# Altium footprint library FootPrintLib_9.PcbLib: 287 footprints (part 18 of 18)
Each footprint in its own frame and in the unit in brackets; x right, y up, seen from the top. Pads: shape width x height; smd on the part's side, far side on the other; paste and mask are expansions set on the pad; w line width, h text height; cw(c..) or ccw(c..) is an arc to the next point about the centre after c.
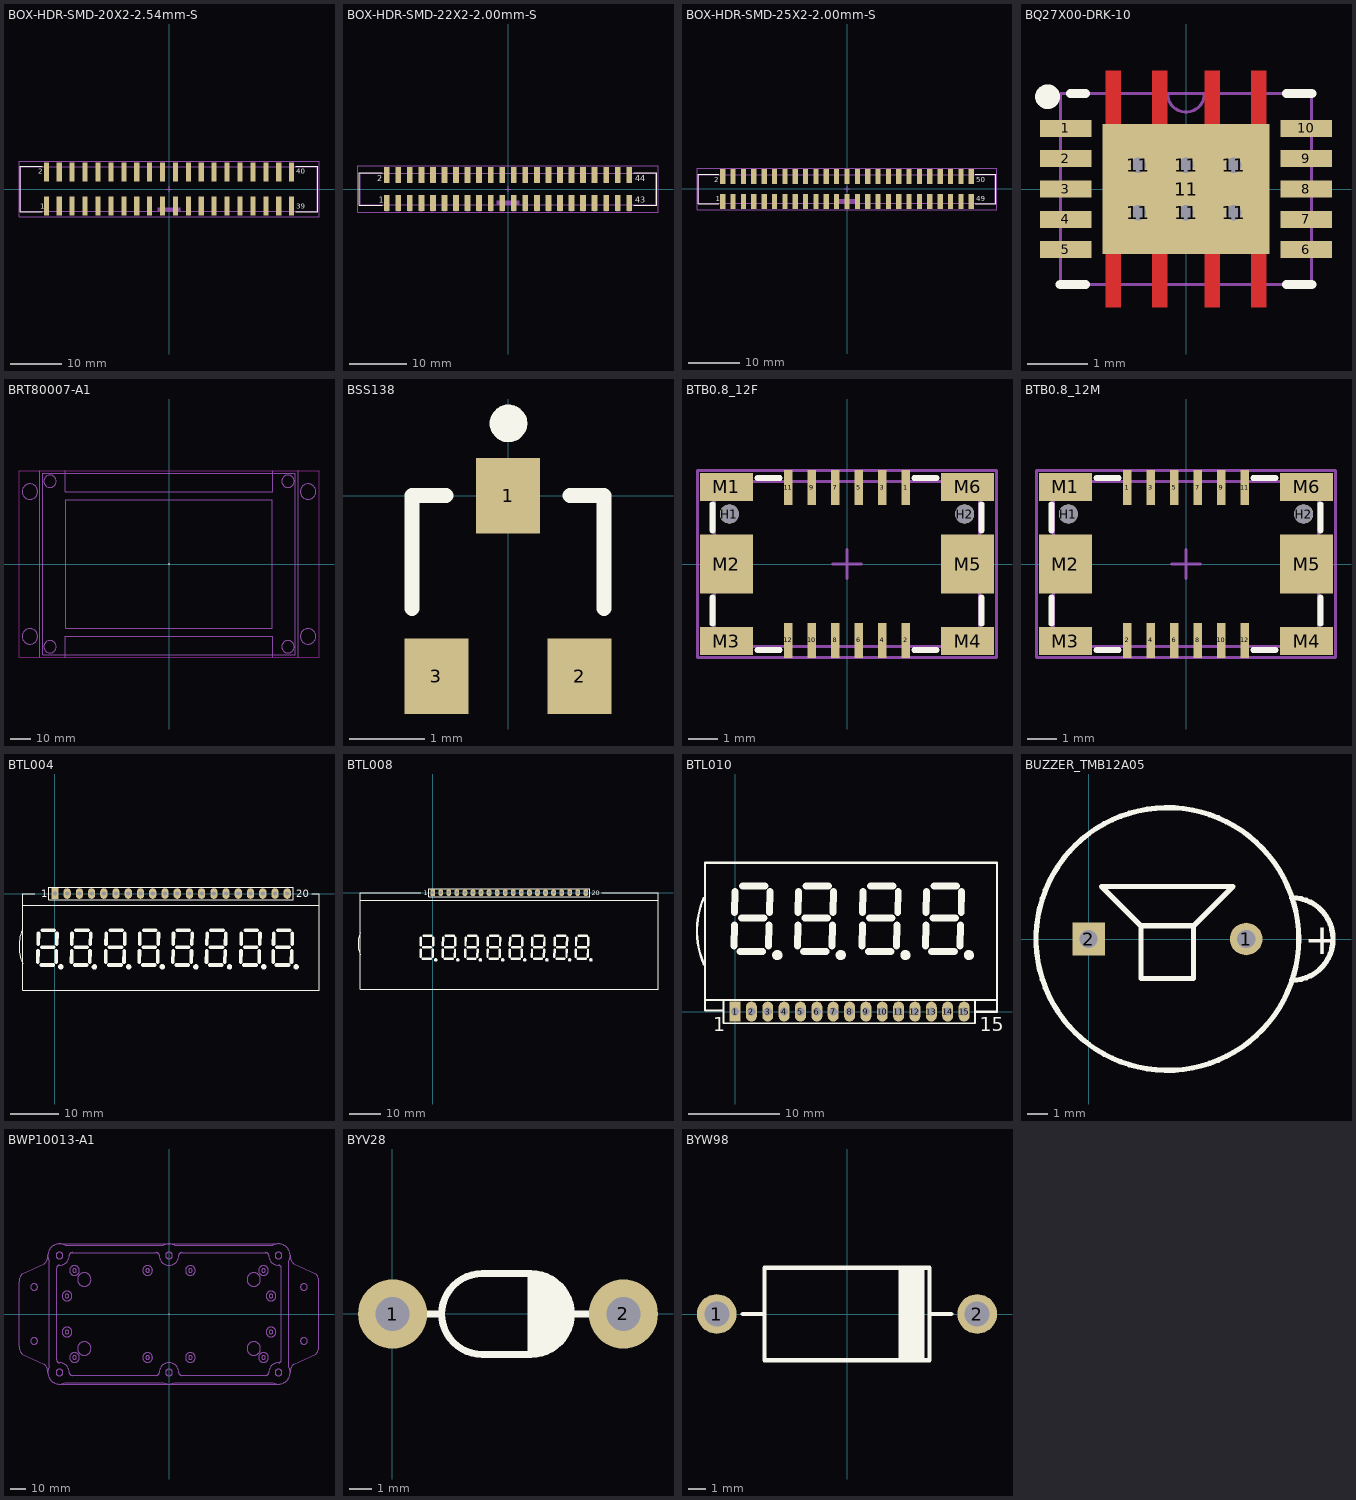
[diagram p17: the footprints below, top view; thin cyan lines are the x and y axes]

## BOX-HDR-SMD-20X2-2.54mm-S [mm] "40 pins, SMT, straight, gold plating"
height 9.2
pads (40):
  rect 1x3.75 smd: 1(-24.13,-3.375) 2(-24.13,3.375) 3(-21.59,-3.375) 4(-21.59,3.375) 5(-19.05,-3.375) 6(-19.05,3.375) 7(-16.51,-3.375) 8(-16.51,3.375) 9(-13.97,-3.375) 10(-13.97,3.375) 11(-11.43,-3.375) 12(-11.43,3.375) 13(-8.89,-3.375) 14(-8.89,3.375) 15(-6.35,-3.375) 16(-6.35,3.375) 17(-3.81,-3.375) 18(-3.81,3.375) 19(-1.27,-3.375) 20(-1.27,3.375) 21(1.27,-3.375) 22(1.27,3.375) 23(3.81,-3.375) 24(3.81,3.375) 25(6.35,-3.375) 26(6.35,3.375) 27(8.89,-3.375) 28(8.89,3.375) 29(11.43,-3.375) 30(11.43,3.375) 31(13.97,-3.375) 32(13.97,3.375) 33(16.51,-3.375) 34(16.51,3.375) 35(19.05,-3.375) 36(19.05,3.375) 37(21.59,-3.375) 38(21.59,3.375) 39(24.13,-3.375) 40(24.13,3.375)
Top Overlay:
  lines w0.2: -24.92,-4.5 -29.3,-4.5 -29.3,4.5 -24.92,4.5 ; 24.92,-4.5 29.3,-4.5 29.3,4.5 24.92,4.5
  text "1" at -25.32,-3.9 h1.02
  text "2" at -25.72,3 h1.02
  text "40" at 25.02,3 h1.02
  text "39" at 25.02,-3.9 h1.02
Mechanical 13:
  rectangle: -2.25,-4.4 2.25,-3.6
  lines w0.1: -29.15,-4.4 29.15,-4.4 29.15,4.4 -29.15,4.4 -29.15,-4.4
Mechanical 15:
  lines w0.05: -0.5,0 0.5,0 ; 0,-0.5 0,0.5 ; -29.5,-5.45 -29.5,5.45 29.5,5.45 29.5,-5.45 -29.5,-5.45
3D body "61204020621.stp": height 10.2, standoff 0.01, extent -29.21,-4.75 29.21,4.75

## BOX-HDR-SMD-22X2-2.00mm-S [mm] "2.00mm Male SMT Box Header, 44p"
height 6.8
pads (44):
  rect 1x2.85 smd: 1(-21,-2.425) 2(-21,2.425) 3(-19,-2.425) 4(-19,2.425) 5(-17,-2.425) 6(-17,2.425) 7(-15,-2.425) 8(-15,2.425) 9(-13,-2.425) 10(-13,2.425) 11(-11,-2.425) 12(-11,2.425) 13(-9,-2.425) 14(-9,2.425) 15(-7,-2.425) 16(-7,2.425) 17(-5,-2.425) 18(-5,2.425) 19(-3,-2.425) 20(-3,2.425) 21(-1,-2.425) 22(-1,2.425) 23(1,-2.425) 24(1,2.425) 25(3,-2.425) 26(3,2.425) 27(5,-2.425) 28(5,2.425) 29(7,-2.425) 30(7,2.425) 31(9,-2.425) 32(9,2.425) 33(11,-2.425) 34(11,2.425) 35(13,-2.425) 36(13,2.425) 37(15,-2.425) 38(15,2.425) 39(17,-2.425) 40(17,2.425) 41(19,-2.425) 42(19,2.425) 43(21,-2.425) 44(21,2.425)
Top Overlay:
  lines w0.2: -21.8,-2.85 -25.775,-2.85 -25.775,2.85 -21.8,2.85 ; 21.8,-2.85 25.775,-2.85 25.775,2.85 21.8,2.85
  text "2" at -22.6,1.3 h1.02
  text "1" at -22.4,-2.4 h1.02
  text "44" at 22,1.3 h1.02
  text "43" at 22,-2.4 h1.02
Mechanical 13:
  rectangle: -2,-2.75 2,-1.95
  lines w0.1: -21.25,-2.75 -21.25,-3.75 -20.75,-3.75 -20.75,-2.75 ; -21.25,2.75 -21.25,3.75 -20.75,3.75 -20.75,2.75 ; -19.25,-2.75 -19.25,-3.75 -18.75,-3.75 -18.75,-2.75 ; -19.25,2.75 -19.25,3.75 -18.75,3.75 -18.75,2.75 ; -17.25,-2.75 -17.25,-3.75 -16.75,-3.75 -16.75,-2.75 ; -17.25,2.75 -17.25,3.75 -16.75,3.75 -16.75,2.75 ; -15.25,-2.75 -15.25,-3.75 -14.75,-3.75 -14.75,-2.75 ; -15.25,2.75 -15.25,3.75 -14.75,3.75 -14.75,2.75 ; -13.25,-2.75 -13.25,-3.75 -12.75,-3.75 -12.75,-2.75 ; -13.25,2.75 -13.25,3.75 -12.75,3.75 -12.75,2.75 ; -11.25,-2.75 -11.25,-3.75 -10.75,-3.75 -10.75,-2.75 ; -11.25,2.75 -11.25,3.75 -10.75,3.75 -10.75,2.75 ; -9.25,-2.75 -9.25,-3.75 -8.75,-3.75 -8.75,-2.75 ; -9.25,2.75 -9.25,3.75 -8.75,3.75 -8.75,2.75 ; -7.25,-2.75 -7.25,-3.75 -6.75,-3.75 -6.75,-2.75 ; -7.25,2.75 -7.25,3.75 -6.75,3.75 -6.75,2.75 ; -5.25,-2.75 -5.25,-3.75 -4.75,-3.75 -4.75,-2.75 ; -5.25,2.75 -5.25,3.75 -4.75,3.75 -4.75,2.75 ; -3.25,-2.75 -3.25,-3.75 -2.75,-3.75 -2.75,-2.75 ; -3.25,2.75 -3.25,3.75 -2.75,3.75 -2.75,2.75 ; -1.25,-2.75 -1.25,-3.75 -0.75,-3.75 -0.75,-2.75 ; -1.25,2.75 -1.25,3.75 -0.75,3.75 -0.75,2.75 ; 0.75,-2.75 0.75,-3.75 1.25,-3.75 1.25,-2.75 ; 0.75,2.75 0.75,3.75 1.25,3.75 1.25,2.75 ; 2.75,-2.75 2.75,-3.75 3.25,-3.75 3.25,-2.75 ; 2.75,2.75 2.75,3.75 3.25,3.75 3.25,2.75 ; 4.75,-2.75 4.75,-3.75 5.25,-3.75 5.25,-2.75 ; 4.75,2.75 4.75,3.75 5.25,3.75 5.25,2.75 ; 6.75,-2.75 6.75,-3.75 7.25,-3.75 7.25,-2.75 ; 6.75,2.75 6.75,3.75 7.25,3.75 7.25,2.75 ; 8.75,-2.75 8.75,-3.75 9.25,-3.75 9.25,-2.75 ; 8.75,2.75 8.75,3.75 9.25,3.75 9.25,2.75 ; 10.75,-2.75 10.75,-3.75 11.25,-3.75 11.25,-2.75 ; 10.75,2.75 10.75,3.75 11.25,3.75 11.25,2.75 ; 12.75,-2.75 12.75,-3.75 13.25,-3.75 13.25,-2.75 ; 12.75,2.75 12.75,3.75 13.25,3.75 13.25,2.75 ; 14.75,-2.75 14.75,-3.75 15.25,-3.75 15.25,-2.75 ; 14.75,2.75 14.75,3.75 15.25,3.75 15.25,2.75 ; 16.75,-2.75 16.75,-3.75 17.25,-3.75 17.25,-2.75 ; 16.75,2.75 16.75,3.75 17.25,3.75 17.25,2.75 ; 18.75,-2.75 18.75,-3.75 19.25,-3.75 19.25,-2.75 ; 18.75,2.75 18.75,3.75 19.25,3.75 19.25,2.75 ; 20.75,-2.75 20.75,-3.75 21.25,-3.75 21.25,-2.75 ; 20.75,2.75 20.75,3.75 21.25,3.75 21.25,2.75 ; -25.625,-2.75 25.625,-2.75 25.625,2.75 -25.625,2.75 -25.625,-2.75
Mechanical 15:
  lines w0.05: -0.5,0 0.5,0 ; 0,-0.5 0,0.5 ; -25.975,-4.05 -25.975,4.05 25.975,4.05 25.975,-4.05 -25.975,-4.05
3D body "62534420621 (rev1).stp": height 8.55, standoff 0, extent -25.625,-3.75 25.625,3.75

## BOX-HDR-SMD-25X2-2.00mm-S [mm] "2.00mm Male SMT Box Header, 50p"
height 6.8
pads (50):
  rect 1x2.85 smd: 1(-24,-2.425) 2(-24,2.425) 3(-22,-2.425) 4(-22,2.425) 5(-20,-2.425) 6(-20,2.425) 7(-18,-2.425) 8(-18,2.425) 9(-16,-2.425) 10(-16,2.425) 11(-14,-2.425) 12(-14,2.425) 13(-12,-2.425) 14(-12,2.425) 15(-10,-2.425) 16(-10,2.425) 17(-8,-2.425) 18(-8,2.425) 19(-6,-2.425) 20(-6,2.425) 21(-4,-2.425) 22(-4,2.425) 23(-2,-2.425) 24(-2,2.425) 25(0,-2.425) 26(0,2.425) 27(2,-2.425) 28(2,2.425) 29(4,-2.425) 30(4,2.425) 31(6,-2.425) 32(6,2.425) 33(8,-2.425) 34(8,2.425) 35(10,-2.425) 36(10,2.425) 37(12,-2.425) 38(12,2.425) 39(14,-2.425) 40(14,2.425) 41(16,-2.425) 42(16,2.425) 43(18,-2.425) 44(18,2.425) 45(20,-2.425) 46(20,2.425) 47(22,-2.425) 48(22,2.425) 49(24,-2.425) 50(24,2.425)
Top Overlay:
  lines w0.2: -24.8,-2.85 -28.775,-2.85 -28.775,2.85 -24.8,2.85 ; 24.8,-2.85 28.775,-2.85 28.775,2.85 24.8,2.85
  text "1" at -25.4,-2.4 h1.02
  text "2" at -25.6,1.3 h1.02
  text "50" at 25,1.3 h1.02
  text "49" at 25,-2.4 h1.02
Mechanical 13:
  drawing of 155 lines, arcs and shapes, not listed
Mechanical 15:
  lines w0.05: -0.5,0 0.5,0 ; 0,-0.5 0,0.5 ; -28.975,-4.05 28.975,-4.05 28.975,4.05 -28.975,4.05 -28.975,-4.05
3D body "62535020621 (rev1).stp": height 8.55, standoff 0, extent -28.625,-3.75 28.625,3.75

## BQ27X00-DRK-10 [mm] "BQ27200,BQ27000 DRK(S-PVSON-N10)"
height 1
pads (17):
  rect 0.85x0.28 smd paste-0.412: 1(-1.981,1) 2(-1.981,0.5) 3(-1.981,0) 4(-1.981,-0.5) 5(-1.981,-1) 6(1.981,-1) 7(1.981,-0.5) 8(1.981,0) 9(1.981,0.5) 10(1.981,1)
  round 0.508 / inner round 1.524 / far side round 0.508 hole 0.254: 11(-0.787,-0.394) 11(-0.787,0.394) 11(0,-0.394) 11(0,0.394) 11(0.787,-0.394) 11(0.787,0.394)
  rect 2.75x2.15 smd paste-1.362 mask-1.359: 11(0,0)
Top Layer:
  region: -0.31,1.95 -0.31,1.075 -0.56,1.075 -0.56,1.95
  region: 0.31,1.95 0.31,1.075 0.56,1.075 0.56,1.95
  region: -1.075,1.95 -1.075,1.075 -1.325,1.075 -1.325,1.95
  region: 1.075,1.95 1.075,1.075 1.325,1.075 1.325,1.95
  region: -0.31,-1.95 -0.31,-1.075 -0.56,-1.075 -0.56,-1.95
  region: 0.31,-1.95 0.31,-1.075 0.56,-1.075 0.56,-1.95
  region: -1.075,-1.95 -1.075,-1.075 -1.325,-1.075 -1.325,-1.95
  region: 1.075,-1.95 1.075,-1.075 1.325,-1.075 1.325,-1.95
Top Overlay:
  circle w0.254: c-2.286,1.524 r0.076
  lines w0.152: -2.075,-1.575 -1.658,-1.575 ; -1.905,1.575 -1.658,1.575 ; 1.658,-1.575 2.075,-1.575 ; 1.658,1.575 2.075,1.575
Top Paste:
  region: -1.581,1.115 -2.381,1.115 -2.381,0.885 -1.581,0.885
  region: -1.581,0.615 -2.381,0.615 -2.381,0.385 -1.581,0.385
  region: -1.581,0.115 -2.381,0.115 -2.381,-0.115 -1.581,-0.115
  region: -1.581,-0.385 -2.381,-0.385 -2.381,-0.615 -1.581,-0.615
  region: -1.581,-0.885 -2.381,-0.885 -2.381,-1.115 -1.581,-1.115
  region: 2.381,-0.885 1.581,-0.885 1.581,-1.115 2.381,-1.115
  region: 2.381,-0.385 1.581,-0.385 1.581,-0.615 2.381,-0.615
  region: 2.381,0.115 1.581,0.115 1.581,-0.115 2.381,-0.115
  region: 2.381,0.615 1.581,0.615 1.581,0.385 2.381,0.385
  region: 2.381,1.115 1.581,1.115 1.581,0.885 2.381,0.885
  region: -0.335,1.925 -0.335,1.1 -0.535,1.1 -0.535,1.925
  region: 0.335,1.925 0.335,1.1 0.535,1.1 0.535,1.925
  region: -1.1,1.925 -1.1,1.1 -1.3,1.1 -1.3,1.925
  region: 1.1,1.925 1.1,1.1 1.3,1.1 1.3,1.925
  region: -0.335,-1.925 -0.335,-1.1 -0.535,-1.1 -0.535,-1.925
  region: 0.335,-1.925 0.335,-1.1 0.535,-1.1 0.535,-1.925
  region: -1.1,-1.925 -1.1,-1.1 -1.3,-1.1 -1.3,-1.925
  region: 1.1,-1.925 1.1,-1.1 1.3,-1.1 1.3,-1.925
  region: -0.887,1 -1.3,1 -1.3,0.494 -1.029,0.494 -0.887,0.635
  region: -1.029,0.294 -1.3,0.294 -1.3,-0.294 -1.029,-0.294 -0.887,-0.152 -0.887,0.152
  region: -1.029,-0.494 -1.3,-0.494 -1.3,-1 -0.887,-1 -0.887,-0.635
  region: -0.1,1 -0.687,1 -0.687,0.635 -0.546,0.494 -0.241,0.494 -0.1,0.635
  region: -0.241,0.294 -0.546,0.294 -0.687,0.152 -0.687,-0.152 -0.546,-0.294 -0.241,-0.294 -0.1,-0.152 -0.1,0.152
  region: -0.241,-0.494 -0.546,-0.494 -0.687,-0.635 -0.687,-1 -0.1,-1 -0.1,-0.635
  region: 0.687,1 0.1,1 0.1,0.635 0.241,0.494 0.546,0.494 0.687,0.635
  region: 0.546,0.294 0.241,0.294 0.1,0.152 0.1,-0.152 0.241,-0.294 0.546,-0.294 0.687,-0.152 0.687,0.152
  region: 0.546,-0.494 0.241,-0.494 0.1,-0.635 0.1,-1 0.687,-1 0.687,-0.635
  region: 1.3,1 0.887,1 0.887,0.635 1.029,0.494 1.3,0.494
  region: 1.3,0.294 1.029,0.294 0.887,0.152 0.887,-0.152 1.029,-0.294 1.3,-0.294
  region: 1.3,-0.494 1.029,-0.494 0.887,-0.635 0.887,-1 1.3,-1
Top Solder:
  region: -1.486,1.21 -2.476,1.21 -2.476,0.79 -1.486,0.79
  region: -1.486,0.71 -2.476,0.71 -2.476,0.29 -1.486,0.29
  region: -1.486,0.21 -2.476,0.21 -2.476,-0.21 -1.486,-0.21
  region: -1.486,-0.29 -2.476,-0.29 -2.476,-0.71 -1.486,-0.71
  region: -1.486,-0.79 -2.476,-0.79 -2.476,-1.21 -1.486,-1.21
  region: 2.476,-0.79 1.486,-0.79 1.486,-1.21 2.476,-1.21
  region: 2.476,-0.29 1.486,-0.29 1.486,-0.71 2.476,-0.71
  region: 2.476,0.21 1.486,0.21 1.486,-0.21 2.476,-0.21
  region: 2.476,0.71 1.486,0.71 1.486,0.29 2.476,0.29
  region: 2.476,1.21 1.486,1.21 1.486,0.79 2.476,0.79
  region: -0.31,1.95 -0.31,1.075 -0.56,1.075 -0.56,1.95
  region: 0.31,1.95 0.31,1.075 0.56,1.075 0.56,1.95
  region: -1.075,1.95 -1.075,1.075 -1.325,1.075 -1.325,1.95
  region: 1.075,1.95 1.075,1.075 1.325,1.075 1.325,1.95
  region: -0.31,-1.95 -0.31,-1.075 -0.56,-1.075 -0.56,-1.95
  region: 0.31,-1.95 0.31,-1.075 0.56,-1.075 0.56,-1.95
  region: -1.075,-1.95 -1.075,-1.075 -1.325,-1.075 -1.325,-1.95
  region: 1.075,-1.95 1.075,-1.075 1.325,-1.075 1.325,-1.95
  region: -1.439,0.594 -1.439,1.138 1.439,1.138 1.439,0.594
  region: -1.439,-0.194 -1.439,0.194 1.439,0.194 1.439,-0.194
  region: -1.439,-1.138 -1.439,-0.594 1.439,-0.594 1.439,-1.138
  region: -1.439,-1.138 -1.439,1.138 -0.987,1.138 -0.987,-1.138
  region: -0.2,-1.138 -0.2,1.138 -0.587,1.138 -0.587,-1.138
  region: 0.587,-1.138 0.587,1.138 0.2,1.138 0.2,-1.138
  region: 0.987,-1.138 0.987,1.138 1.439,1.138 1.439,-1.138
Mechanical 13:
  lines w0.051: -0.305,1.575 ccw(c0,1.575) 0.305,1.575 ; -2.075,-1.575 2.075,-1.575 2.075,1.575 -2.075,1.575 -2.075,-1.575 ; -2.075,-1.15 -2.075,-0.85 -2.075,-1.15 ; -2.075,-0.65 -2.075,-0.35 -2.075,-0.65 ; -2.075,-0.15 -2.075,0.15 -2.075,-0.15 ; -2.075,0.35 -2.075,0.65 -2.075,0.35 ; -2.075,0.85 -2.075,1.15 -2.075,0.85 ; 2.075,-1.15 2.075,-0.85 2.075,-1.15 ; 2.075,-0.65 2.075,-0.35 2.075,-0.65 ; 2.075,-0.15 2.075,0.15 2.075,-0.15 ; 2.075,0.35 2.075,0.65 2.075,0.35 ; 2.075,0.85 2.075,1.15 2.075,0.85
3D body: height 1, standoff 0, extent -2.083,-1.575 2.083,1.575
3D body: height 1.01, standoff 0, extent -1.976,1.07 -1.578,1.47

## BRT80007-A1 [mm]
height 40
via 0,0 diameter 0.8 hole 0.5
Keep-Out Layer:
  lines w0.254: -72.5,-45 72.5,-45 72.5,45 -72.5,45 -72.5,-45
Mechanical 5:
  circle w0.254: c-57.5,40 r3
  circle w0.254: c-57.5,-40 r3
  circle w0.254: c57.5,-40 r3
  circle w0.254: c67.25,-35 r3.75
  circle w0.254: c67.25,35 r3.75
  circle w0.254: c-67.25,35 r3.75
  circle w0.254: c-67.25,-35 r3.75
  circle w0.254: c57.5,40 r3
  lines w0.254: -62.5,-45 -62.5,45 ; -50.15,-45 -50.15,-35 50.15,-35 50.15,-45 ; -50.15,45 -50.15,35 50.15,35 50.15,45 ; 62.5,-45 62.5,45 ; -50,-31 -50,31 50,31 50,-31 -50,-31
Mechanical 15:
  lines w0.254: -61.11,-43.9 61.11,-43.9 61.11,43.9 -61.11,43.9 -61.11,-43.9

## BSS138 [mm]
pads (3):
  rect 0.85x1 smd: 1(0,0) 2(0.95,-2.4) 3(-0.95,-2.4)
Top Overlay:
  circle w0.25: c0.007,0.959 r0.125
  lines w0.2: -1.275,-1.5 -1.275,0 -0.825,0 ; 0.825,0 1.275,0 1.275,-1.5

## BTB0.8_12F [mm] "BTB0.8-12M/F-6.0LG"
height 3.35
pads (20):
  rect 0.3x1.2 smd: 1(2,2.6) 2(2,-2.6) 3(1.2,2.6) 4(1.2,-2.6) 5(0.4,2.6) 6(0.4,-2.6) 7(-0.4,2.6) 8(-0.4,-2.6) 9(-1.2,2.6) 10(-1.2,-2.6) 11(-2,2.6) 12(-2,-2.6)
  round 0.65 hole 0.65 unplated mask-1: H1(-4,1.7) H2(4,1.7)
  rect 1.8x0.95 smd: M1(-4.1,2.625) M3(-4.1,-2.625) M4(4.1,-2.625) M6(4.1,2.625)
  rect 1.8x2 smd: M2(-4.1,0) M5(4.1,0)
Top Overlay:
  lines w0.2: -4.572,-2.032 -4.572,-1.143 ; -4.572,1.143 -4.572,2.032 ; -3.048,-2.921 -2.286,-2.921 ; -3.048,2.921 -2.286,2.921 ; 2.286,-2.921 3.048,-2.921 ; 2.286,2.921 3.048,2.921 ; 4.572,-2.032 4.572,-1.143 ; 4.572,1.143 4.572,2.032
Mechanical 13:
  lines w0.1: -4.5,-2.8 -4.5,2.8 4.5,2.8 4.5,-2.8 -4.5,-2.8
Mechanical 15:
  lines w0.1: -0.5,0 0.5,0 ; 0,-0.5 0,0.5 ; -5.08,-3.175 -5.08,3.175 5.08,3.175 5.08,-3.175 -5.08,-3.175
3D body "BTB0.8_12F.STEP": height 2.35, standoff -0.55, extent -4.5,-2.85 4.5,2.85

## BTB0.8_12M [mm] "BTB0.8-12M/F-6.0LG"
height 3.35
pads (20):
  rect 0.3x1.2 smd: 1(-2,2.6) 2(-2,-2.6) 3(-1.2,2.6) 4(-1.2,-2.6) 5(-0.4,2.6) 6(-0.4,-2.6) 7(0.4,2.6) 8(0.4,-2.6) 9(1.2,2.6) 10(1.2,-2.6) 11(2,2.6) 12(2,-2.6)
  round 0.65 hole 0.65 unplated mask-1: H1(-4,1.7) H2(4,1.7)
  rect 1.8x0.95 smd: M1(-4.1,2.625) M3(-4.1,-2.625) M4(4.1,-2.625) M6(4.1,2.625)
  rect 1.8x2 smd: M2(-4.1,0) M5(4.1,0)
Top Overlay:
  lines w0.2: -4.572,-2.032 -4.572,-1.143 ; -4.572,1.143 -4.572,2.032 ; -3.048,-2.921 -2.286,-2.921 ; -3.048,2.921 -2.286,2.921 ; 2.286,-2.921 3.048,-2.921 ; 2.286,2.921 3.048,2.921 ; 4.572,-2.032 4.572,-1.143 ; 4.572,1.143 4.572,2.032
Mechanical 13:
  lines w0.1: -4.5,-2.8 4.5,-2.8 4.5,2.8 -4.5,2.8 -4.5,-2.8
Mechanical 15:
  lines w0.1: -0.5,0 0.5,0 ; 0,-0.5 0,0.5 ; -5.08,-3.175 5.08,-3.175 5.08,3.175 -5.08,3.175 -5.08,-3.175
3D body "BTB0.8_12M.STEP": height 2.35, standoff -0.55, extent -4.5,-2.85 4.5,2.85

## BTL004 [mm] "BTL004"
height 2.8
pads (20):
  rect 1.5x2.2 hole 0.9: 1(0,0)
  oval 1.5x2.2 hole 0.9: 2(2.54,0) 3(5.08,0) 4(7.62,0) 5(10.16,0) 6(12.7,0) 7(15.24,0) 8(17.78,0) 9(20.32,0) 10(22.86,0) 11(25.4,0) 12(27.94,0) 13(30.48,0) 14(33.02,0) 15(35.56,0) 16(38.1,0) 17(40.64,0) 18(43.18,0) 19(45.72,0) 20(48.26,0)
Top Overlay:
  circle w1.016: c1.219,-15.24 r0.051
  circle w1.016: c8.204,-15.24 r0.051
  circle w1.016: c15.316,-15.24 r0.051
  circle w1.016: c22.301,-15.24 r0.051
  circle w1.016: c29.286,-15.24 r0.051
  circle w1.016: c36.271,-15.24 r0.051
  circle w1.016: c43.383,-15.24 r0.051
  circle w1.016: c50.114,-15.24 r0.051
  lines w0.2: -1.27,-1.27 -1.27,1.27 0.635,1.27 49.53,1.27 49.53,-1.27 -1.27,-1.27
  lines w0.254: -6.813,-7.52 ccw(c1.77,-10.929) -6.713,-14.58 ; -6.731,-2.413 54.864,-2.413 ; -4.191,0 -6.731,0 -6.731,-20.066 54.864,-20.066 54.864,0 53.34,0
  lines w0.762: -3.556,-14.224 -3.505,-11.938 ; -3.48,-10.541 -3.429,-8.255 ; -2.87,-14.859 -0.381,-14.859 ; -2.743,-11.176 -0.254,-11.176 ; -2.616,-7.62 -0.127,-7.62 ; 0.254,-14.224 0.305,-11.938 ; 0.381,-10.541 0.432,-8.255 ; 3.429,-14.224 3.48,-11.938 ; 3.505,-10.541 3.556,-8.255 ; 4.115,-14.859 6.604,-14.859 ; 4.242,-11.176 6.731,-11.176 ; 4.369,-7.62 6.858,-7.62 ; 7.239,-14.224 7.29,-11.938 ; 7.366,-10.541 7.417,-8.255 ; 10.541,-14.224 10.592,-11.938 ; 10.617,-10.541 10.668,-8.255 ; 11.227,-14.859 13.716,-14.859 ; 11.354,-11.176 13.843,-11.176 ; 11.481,-7.62 13.97,-7.62 ; 14.351,-14.224 14.402,-11.938 ; 14.478,-10.541 14.529,-8.255 ; 17.526,-14.224 17.577,-11.938 ; 17.602,-10.541 17.653,-8.255 ; 18.212,-14.859 20.701,-14.859 ; 18.339,-11.176 20.828,-11.176 ; 18.466,-7.62 20.955,-7.62 ; 21.336,-14.224 21.387,-11.938 ; 21.463,-10.541 21.514,-8.255 ; 24.511,-14.224 24.562,-11.938 ; 24.587,-10.541 24.638,-8.255 ; 25.197,-14.859 27.686,-14.859 ; 25.324,-11.176 27.813,-11.176 ; 25.451,-7.62 27.94,-7.62 ; 28.321,-14.224 28.372,-11.938 ; 28.448,-10.541 28.499,-8.255 ; 31.496,-14.224 31.547,-11.938 ; 31.572,-10.541 31.623,-8.255 ; 32.182,-14.859 34.671,-14.859 ; 32.309,-11.176 34.798,-11.176 ; 32.436,-7.62 34.925,-7.62 ; 35.306,-14.224 35.357,-11.938 ; 35.433,-10.541 35.484,-8.255 ; 38.608,-14.224 38.659,-11.938 ; 38.684,-10.541 38.735,-8.255 ; 39.294,-14.859 41.783,-14.859 ; 39.421,-11.176 41.91,-11.176 ; 39.548,-7.62 42.037,-7.62 ; 42.418,-14.224 42.469,-11.938 ; 42.545,-10.541 42.596,-8.255 ; 45.339,-14.224 45.39,-11.938 ; 45.415,-10.541 45.466,-8.255 ; 46.025,-14.859 48.514,-14.859 ; 46.152,-11.176 48.641,-11.176 ; 46.279,-7.62 48.768,-7.62 ; 49.149,-14.224 49.2,-11.938 ; 49.276,-10.541 49.327,-8.255
  text "20" at 50.165,-0.762 h1.52
  text "1" at -2.794,-0.762 h1.52
3D body: height 2.8, standoff 0, extent -6.731,-20.193 54.864,-2.413
3D body: height 2, standoff 0, extent -6.731,-2.413 54.864,0
3D body: height 2.4, standoff 0.4, extent -7.493,-14.224 -6.731,-7.747

## BTL008 [mm]
pads (20):
  rect 1.5x2.2 hole 0.9: 1(0,0)
  oval 1.5x2.2 hole 0.9: 2(2.54,0) 3(5.08,0) 4(7.62,0) 5(10.16,0) 6(12.7,0) 7(15.24,0) 8(17.78,0) 9(20.32,0) 10(22.86,0) 11(25.4,0) 12(27.94,0) 13(30.48,0) 14(33.02,0) 15(35.56,0) 16(38.1,0) 17(40.64,0) 18(43.18,0) 19(45.72,0) 20(48.26,0)
Top Overlay:
  circle w1.016: c49.86,-21.209 r0.051
  circle w1.016: c43.129,-21.209 r0.051
  circle w1.016: c36.017,-21.209 r0.051
  circle w1.016: c29.032,-21.209 r0.051
  circle w1.016: c22.047,-21.209 r0.051
  circle w1.016: c15.062,-21.209 r0.051
  circle w1.016: c7.95,-21.209 r0.051
  circle w1.016: c0.965,-21.209 r0.051
  lines w0.2: -1.27,-1.27 49.53,-1.27 49.53,1.27 0.635,1.27 -1.27,1.27 -1.27,-1.27
  lines w0.254: -22.86,-12.573 ccw(c-14.277,-15.982) -22.76,-19.633 ; -22.733,-2.413 70.866,-2.413 ; -3.81,0 -22.733,0 -22.733,-30.48 70.993,-30.48 70.993,0 53.34,0
  lines w0.762: -3.81,-20.193 -3.759,-17.907 ; -3.734,-16.51 -3.683,-14.224 ; -3.124,-20.828 -0.635,-20.828 ; -2.997,-17.145 -0.508,-17.145 ; -2.87,-13.589 -0.381,-13.589 ; 0,-20.193 0.051,-17.907 ; 0.127,-16.51 0.178,-14.224 ; 3.175,-20.193 3.226,-17.907 ; 3.251,-16.51 3.302,-14.224 ; 3.861,-20.828 6.35,-20.828 ; 3.988,-17.145 6.477,-17.145 ; 4.115,-13.589 6.604,-13.589 ; 6.985,-20.193 7.036,-17.907 ; 7.112,-16.51 7.163,-14.224 ; 10.287,-20.193 10.338,-17.907 ; 10.363,-16.51 10.414,-14.224 ; 10.973,-20.828 13.462,-20.828 ; 11.1,-17.145 13.589,-17.145 ; 11.227,-13.589 13.716,-13.589 ; 14.097,-20.193 14.148,-17.907 ; 14.224,-16.51 14.275,-14.224 ; 17.272,-20.193 17.323,-17.907 ; 17.348,-16.51 17.399,-14.224 ; 17.958,-20.828 20.447,-20.828 ; 18.085,-17.145 20.574,-17.145 ; 18.212,-13.589 20.701,-13.589 ; 21.082,-20.193 21.133,-17.907 ; 21.209,-16.51 21.26,-14.224 ; 24.257,-20.193 24.308,-17.907 ; 24.333,-16.51 24.384,-14.224 ; 24.943,-20.828 27.432,-20.828 ; 25.07,-17.145 27.559,-17.145 ; 25.197,-13.589 27.686,-13.589 ; 28.067,-20.193 28.118,-17.907 ; 28.194,-16.51 28.245,-14.224 ; 31.242,-20.193 31.293,-17.907 ; 31.318,-16.51 31.369,-14.224 ; 31.928,-20.828 34.417,-20.828 ; 32.055,-17.145 34.544,-17.145 ; 32.182,-13.589 34.671,-13.589 ; 35.052,-20.193 35.103,-17.907 ; 35.179,-16.51 35.23,-14.224 ; 38.354,-20.193 38.405,-17.907 ; 38.43,-16.51 38.481,-14.224 ; 39.04,-20.828 41.529,-20.828 ; 39.167,-17.145 41.656,-17.145 ; 39.294,-13.589 41.783,-13.589 ; 42.164,-20.193 42.215,-17.907 ; 42.291,-16.51 42.342,-14.224 ; 45.085,-20.193 45.136,-17.907 ; 45.161,-16.51 45.212,-14.224 ; 45.771,-20.828 48.26,-20.828 ; 45.898,-17.145 48.387,-17.145 ; 46.025,-13.589 48.514,-13.589 ; 48.895,-20.193 48.946,-17.907 ; 49.022,-16.51 49.073,-14.224
  text "1" at -2.794,-0.762 h1.52
  text "20" at 50.165,-0.762 h1.52
3D body: height 2.4, standoff 0.4, extent -23.368,-19.812 -22.606,-13.335
3D body: height 2, standoff 0, extent -22.606,-2.413 70.993,0
3D body: height 2.8, standoff 0, extent -22.733,-30.449 70.739,-2.286

## BTL010 [mm] "BTL010"
height 2.8
pads (15):
  rect 1.2x2.2 hole 0.9: 1(0,0)
  oval 1.2x2.2 hole 0.9: 2(1.8,0) 3(3.6,0) 4(5.4,0) 5(7.2,0) 6(9,0) 7(10.8,0) 8(12.6,0) 9(14.4,0) 10(16.2,0) 11(18,0) 12(19.8,0) 13(21.6,0) 14(23.4,0) 15(25.2,0)
Top Overlay:
  circle w1.016: c25.73,6.223 r0.051
  circle w1.016: c18.745,6.223 r0.051
  circle w1.016: c11.633,6.223 r0.051
  circle w1.016: c4.648,6.223 r0.051
  lines w0.2: -1.27,-1.27 26.416,-1.27 26.416,1.27 0.635,1.27 -1.27,1.27 -1.27,-1.27
  lines w0.254: -3.452,12.51 ccw(c5.072,8.883) -3.437,5.221 ; -3.302,1.397 -3.302,0.127 -1.27,0.127 ; 26.543,0 28.829,0 28.829,1.27 ; 28.829,1.27 28.829,16.383 -3.302,16.383 -3.302,1.27 28.829,1.27
  lines w0.762: -0.127,7.239 -0.076,9.525 ; -0.051,10.922 0,13.208 ; 0.559,6.604 3.048,6.604 ; 0.686,10.287 3.175,10.287 ; 0.813,13.843 3.302,13.843 ; 3.683,7.239 3.734,9.525 ; 3.81,10.922 3.861,13.208 ; 6.858,7.239 6.909,9.525 ; 6.934,10.922 6.985,13.208 ; 7.544,6.604 10.033,6.604 ; 7.671,10.287 10.16,10.287 ; 7.798,13.843 10.287,13.843 ; 10.668,7.239 10.719,9.525 ; 10.795,10.922 10.846,13.208 ; 13.97,7.239 14.021,9.525 ; 14.046,10.922 14.097,13.208 ; 14.656,6.604 17.145,6.604 ; 14.783,10.287 17.272,10.287 ; 14.91,13.843 17.399,13.843 ; 17.78,7.239 17.831,9.525 ; 17.907,10.922 17.958,13.208 ; 20.955,7.239 21.006,9.525 ; 21.031,10.922 21.082,13.208 ; 21.641,6.604 24.13,6.604 ; 21.768,10.287 24.257,10.287 ; 21.895,13.843 24.384,13.843 ; 24.765,7.239 24.816,9.525 ; 24.892,10.922 24.943,13.208
  text "1" at -2.413,-2.159 h1.52
  text "15" at 26.924,-2.159 h1.52
3D body: height 2, standoff 0, extent -3.429,0 28.829,1.333
3D body: height 2.4, standoff 0.4, extent -4.191,5.588 -3.429,12.065
3D body: height 2.8, standoff 0, extent -3.302,1.27 28.829,16.383

## BUZZER_TMB12A05 [mil] "Integrated Buzzer"
height 381.89
pads (2):
  round 62 hole 35: 1(300,0)
  rect 62x62 hole 35: 2(0,0)
Top Overlay:
  circle w10: c150,0 r250
  lines w10: 386.61,-78.74 ccw(c386.61,0) 386.61,78.74 ; 100,25 100,-75 200,-75 200,25 ; 100,25 200,25 ; 100,25 25,100 275,100 200,25
  text "+" at 411,-29 h60
3D body "User Library-Buzzer-WST-1203UX.step": height 379.92, standoff -177.17, extent -86.21,-236.22 522.21,236.23

## BWP10013-A1 [mm] "Water Proof Enclosure"
height 66
via 0,0 diameter 0.8 hole 0.5
Mechanical 5:
  circle w0.254: c-56.5,-23 r4.5
  circle w0.254: c-56.5,23 r4.5
  circle w0.254: c56.5,23 r4.5
  circle w0.254: c56.5,-23 r4.5
  circle w0.254: c68,-12 r3.25
  circle w0.254: c68,-12 r1.25
  circle w0.254: c68,12 r3.25
  circle w0.254: c68,12 r1.25
  circle w0.254: c-68,-12 r3.25
  circle w0.254: c-68,-12 r1.25
  circle w0.254: c-68,12 r3.25
  circle w0.254: c-68,12 r1.25
  circle w0.254: c0,39 r2.25
  circle w0.254: c-89.9,18 r2.25
  circle w0.254: c-89.9,-18 r2.25
  circle w0.254: c89.9,-18 r2.25
  circle w0.254: c89.9,18 r2.25
  circle w0.254: c-14.25,-29 r1.25
  circle w0.254: c-14.25,-29 r3.25
  circle w0.254: c14.25,-29 r1.25
  circle w0.254: c14.25,-29 r3.25
  circle w0.254: c-14.25,29 r3.25
  circle w0.254: c-14.25,29 r1.25
  circle w0.254: c73,-39 r2.25
  circle w0.254: c73,39 r2.25
  circle w0.254: c14.25,29 r3.25
  circle w0.254: c14.25,29 r1.25
  circle w0.254: c-63,29 r1.25
  circle w0.254: c-63,29 r3.25
  circle w0.254: c-73,39 r2.25
  circle w0.254: c-73,-39 r2.25
  circle w0.254: c-63,-29 r3.25
  circle w0.254: c-63,-29 r1.25
  circle w0.254: c0,-39 r2.25
  circle w0.254: c63,-29 r1.25
  circle w0.254: c63,-29 r3.25
  circle w0.254: c63,29 r3.25
  circle w0.254: c63,29 r1.25
  lines w0.254: -80.75,-39 ccw(c-88.5,-39) -83.02,-33.52 -97.73,-26.98 cw(c-92.25,-21.5) -100,-21.5 -100,21.5 cw(c-92.25,21.5) -97.73,26.98 -83.02,33.52 ccw(c-88.5,39) -80.75,39 ; -73,-46.75 73,-46.75 ; -73,46.75 72.263,46.75 ; -69.191,-45.749 cw(c-73,-39) -79.749,-35.191 -79.75,35.191 cw(c-73,39) -69.191,45.749 ; -69.19,-45.75 -3.809,-45.75 ; -69.19,45.75 -3.809,45.75 ; -3.809,-45.749 ccw(c0,-39) 3.809,-45.749 ; -3.809,45.749 cw(c0,39) 3.809,45.749 ; 3.809,-45.75 69.19,-45.75 ; 3.809,45.75 69.19,45.75 ; 69.191,-45.749 ccw(c73,-39) 79.749,-35.191 79.75,35.191 ccw(c73,39) 69.191,45.749 ; 80.75,-39 cw(c88.5,-39) 83.02,-33.52 97.73,-26.98 ccw(c92.25,-21.5) 100,-21.5 100,21.5 ccw(c92.25,21.5) 97.73,26.98 83.02,33.52 cw(c88.5,39) 80.75,39 ; -75,-30.5 ccw(c-73,-30.5) -73,-32.5 cw(c-73,-39) -66.5,-39 ccw(c-64.5,-39) -64.5,-41 -8.5,-41 ccw(c-8.5,-39) -6.5,-39 cw(c0,-39) 6.5,-39 ccw(c8.5,-39) 8.5,-41 64.5,-41 ccw(c64.5,-39) 66.5,-39 cw(c73,-39) 73,-32.5 ccw(c73,-30.5) 75,-30.5 75,30.5 ccw(c73,30.5) 73,32.5 cw(c73,39) 66.5,39 ccw(c64.5,39) 64.5,41 8.5,41 ccw(c8.5,39) 6.5,39 cw(c0,39) -6.5,39 ccw(c-8.5,39) -8.5,41 -64.5,41 ccw(c-64.5,39) -66.5,39 cw(c-73,39) -73,32.5 ccw(c-73,30.5) -75,30.5 -75,-30.5
  text "BWP10013-A1" at -9.652,-20.066 h2

## BYV28 [mil]
pads (2):
  round 120 hole 59.06: 1(0.45,-0.22) 2(400.45,-0.22)
Top Overlay:
  rectangle: 265.44,39.86 285.44,59.86
  rectangle: 240.44,44.86 270.44,64.86
  rectangle: 295.44,-35.14 305.44,34.86
  rectangle: 285.44,-45.14 295.44,39.86
  rectangle: 260.44,-60.14 285.44,-45.14
  rectangle: 240.44,-65.14 270.44,-45.14
  rectangle: 240.44,-50.14 290.44,49.86
  lines w12: 40.45,-0.22 85.45,-0.22 ; 310.45,-0.22 360.45,-0.22 ; 240.45,-70.22 ccw(c240.45,-0.22) 240.45,69.78 ; 240.45,-70.22 240.45,69.78 ; 240.45,-70.22 155.45,-70.22 cw(c155.45,-0.22) 155.45,69.78 240.45,69.78

## BYW98 [mil]
pads (2):
  round 90 hole 57: 1(-295,0) 2(295,0)
Top Overlay:
  region: 175.2,105 175.2,-105 117.72,-105 117.72,105
  lines w10: -236.22,0 -187,0 ; 187,0 236.22,0 ; -187,-105 -187,105 187,105 187,-105 -187,-105
3D body "BYW98.STEP": height 254.33, standoff -86.22, extent -320.47,-105.51 321.26,103.15